# Altium schematic symbol library 三代电容_power.SchLib: 13 symbols
Pins are listed as number, name and electrical type; pins without a type are passive.

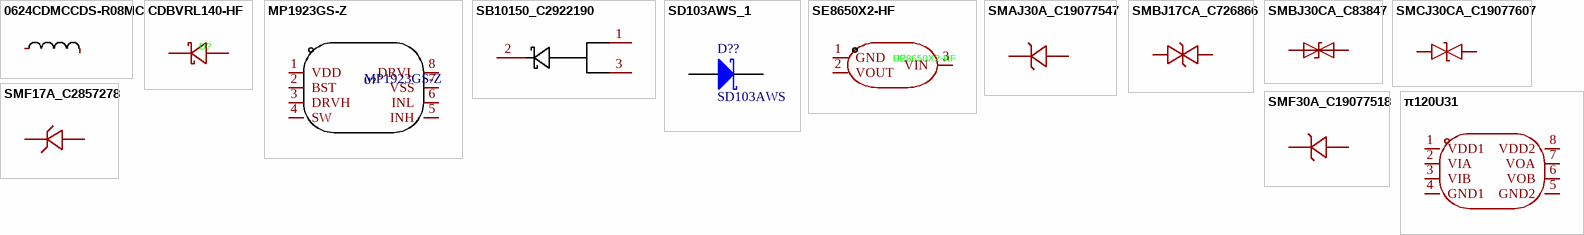
[diagram p0: symbols 0624CDMCCDS-R08MC to π120U31]

## 0624CDMCCDS-R08MC
designator U??  (value not drawn)
80nH; Manufacturer: Sumida(胜美达); Add into BOM: yes; Tolerance: ±20%; Rated Current: 42A; Saturation Current (Isat): 72A; DC Resistance (DCR): 0.7mΩ; Symbol: 0624CDMCCDS-R08MC; Device: 0624CDMCCDS-R08MC; Supplier: LCSC; Supplier Part: C2595937; Manufacturer Part: 0624CDMCCDS-R08MC; Value: 80nH; JLCPCB Part Class: Extended Part; LCSC Part Name: 80nH ±20% 72A; Supplier Footprint: -; Datasheet: https://atta.szlcsc.com/upload/public/pdf/source/20210417/204DE77F66B7BD684ACDD9D2F328B6A3.pdf; Convert to PCB: yes; Type: -; Ratings: -
footprint IND-SMD_L7.1-W6.6
pins: 1, 2

## CDBVRL140-HF
designator D?  (value not drawn)
Manufacturer: Comchip(典琦); Add into BOM: yes; Forward Voltage (Vf@If): 550mV@700mA; Reverse Voltage (Vr): 40V; Rectified Current: 1A; Reverse Leakage Current (Ir): 50uA@40V; Symbol: CDBVRL140-HF; Device: CDBVRL140-HF; LCSC Part Name: 电压:40V 电流:1A; Supplier Part: C3758192; Manufacturer Part: CDBVRL140-HF; Supplier Footprint: 0603; JLCPCB Part Class: Extended Part; Datasheet: https://atta.szlcsc.com/upload/public/pdf/source/20240116/3D60EEEEF0718EF97C1BF0B00CBFA01B.pdf; Supplier: LCSC; Convert to PCB: yes
footprint LED-SMD_L1.6-W0.8-RD-2
3D model LED0603_L1.6-W0.8-H0.6
pins: 1 A, 2 K

## MP1923GS-Z
designator U?
Manufacturer: SCT(芯洲科技); Symbol: SCT2450STER; Add into BOM: yes; Device: SCT2450STER; LCSC Part Name: 电源IC; Supplier Part: C509400; Manufacturer Part: SCT2450STER; Supplier Footprint: ESOP-8; JLCPCB Part Class: Extended Part; Datasheet: https://atta.szlcsc.com/upload/public/pdf/source/20200407/C509400_EDF779A672A59398CFBA9E95FA584FEC.pdf; Supplier: LCSC; Convert to PCB: yes
footprint ESOP-8_L4.9-W3.9-P1.27-LS6.0-BL-EP
pins: 1 VDD, 2 BST, 3 DRVH, 4 SW, 5 INH, 6 INL, 7 VSS, 8 DRVL

## SB10150_C2922190
designator D??  (value not drawn)
10A肖特基; Manufacturer: GOODWORK(固得沃克); Add into BOM: yes; Diode Configuration: 独立式; Forward Voltage (Vf@If): 900mV@10A; Reverse Voltage (Vr): 150V; Average Rectified Current (Io): 10A; Reverse Leakage Current (Ir): 20uA@150V; Symbol: SB10150_C2922190; Device: SB10150_C2922190; Supplier: LCSC; Supplier Part: C2922190; Manufacturer Part: SB10150; JLCPCB Part Class: Extended Part; LCSC Part Name: 电压:150V 电流:10A; Supplier Footprint: TO-277; Datasheet: https://atta.szlcsc.com/upload/public/pdf/source/20211009/AF8C3589B27F0CCB5AD5E667BFB17F78.pdf; Convert to PCB: yes
footprint TO-277_3P-L5.4-W4.0-LS6.5-TR
pins: 1, 2, 3

## SD103AWS_1
designator D??, comment SD103AWS
肖特基二极管; 属性: 40V/1A; BOM名称: 肖特基二极管
footprint SD103AWS
pins: 1 A, 2 K

## SE8650X2-HF
designator U?
5V_LDO; Manufacturer: SEAWARD(思旺); Add into BOM: yes; Output Type: 固定; Voltage - Supply: 80V; Output Voltage: 5V; Voltage Dropout: 700mV@(100mA); standby current: 2uA; Output Configuration: 正极; Number of Outputs: 1; Symbol: SE8650X2-HF; Device: SE8650X2-HF; LCSC Part Name: 输入80V 输出5V 200mA; Supplier Part: C496615; Manufacturer Part: SE8650X2-HF; Supplier Footprint: SOT-23; JLCPCB Part Class: Extended Part; Datasheet: https://atta.szlcsc.com/upload/public/pdf/source/20231204/E5912244F6D9E24D718D6BDA01187AC7.pdf; Supplier: LCSC; Convert to PCB: yes; Output Current: -; Power Supply Rejection Ratio (PSRR): -; Features: 短路保护(SCP)；低ESR；热关断(TSD)；带使能
footprint SOT-23-3_L2.9-W1.6-P1.90-LS2.8-BR
3D model SOT-23-3L_L2.9-W1.6-H1.1-LS2.8-P0.95
pins: 1 GND, 2 VOUT, 3 VIN

## SMAJ30A_C19077547
designator D?, comment SMAJ30A  (value not drawn)
Manufacturer: 宏嘉诚; Symbol: SMAJ30A_C19077547; Add into BOM: yes; Polarity: 单向; Reverse Stand-Off Voltage (Vrwm): 30V; Clamping Voltage: 48.4V; Peak Pulse Current (Ipp): 8.3A; Peak Pulse Power Dissipation (Ppp): 400W; Voltage - Breakdown: 33.3V; Reverse Leakage Current (Ir): 1uA; Number of Channels: 单路; Type: TVS; Device: SMAJ30A_C19077547; LCSC Part Name: SMAJ30A; Supplier Part: C19077547; Manufacturer Part: SMAJ30A; Supplier Footprint: SMA; JLCPCB Part Class: Extended Part; Datasheet: https://atta.szlcsc.com/upload/public/pdf/source/20250107/539D2DC1EE5F9F3FCEFE35DA61E92AD9.pdf; Supplier: LCSC; Convert to PCB: yes; Operating Temperature: -
footprint SMA_L4.3-W2.6-LS5.0-RD
3D model SMA_L4.3-W2.6-LS5.0-RD
pins: 1 K, 2 A

## SMBJ17CA_C726866
designator D?, comment SMBJ17CA  (value not drawn)
17V_tvs; Manufacturer: TWGMC(台湾迪嘉); Symbol: SMBJ17CA_C726866; Add into BOM: yes; polarity: 双向; Reverse Stand-Off Voltage (Vrwm): 17V; Maximum Clamping Voltage: 27.6V; Peak Pulse Current (Ipp): 21.8A; Peak Pulse Power Dissipation (Ppp): 600W; Breakdown Voltage: 20.9V; Reverse Leakage Current (Ir): 1uA; Type: TVS; Device: SMBJ17CA_C726866; LCSC Part Name: SMBJ17CA; Supplier Part: C726866; Manufacturer Part: SMBJ17CA; Supplier Footprint: SMB; JLCPCB Part Class: Extended Part; Datasheet: https://atta.szlcsc.com/upload/public/pdf/source/20200901/C726811_07201DC3516E92FF13903A0BAE18F725.pdf; Supplier: LCSC; Convert to PCB: yes; Operating Temperature: -65℃~+150℃
footprint SMB_L4.6-W3.6-LS5.3-BI
3D model SMB_L4.6-W3.6-LS5.3-BI
pins: 1, 2

## SMBJ30CA_C83847
designator D?, comment SMBJ30CA  (value not drawn)
Manufacturer: Littelfuse(美国力特); Symbol: SMBJ30CA_C83847; Add into BOM: yes; Reverse Stand-Off Voltage (Vrwm): 30V; Maximum Clamping Voltage: 48.4V; Peak Pulse Current (Ipp)@10/1000us: 12.4A; Peak Pulse Power Dissipation (Ppp)@10/1000us: 600W; Breakdown Voltage: 33.3V; Type: TVS; Device: SMBJ30CA_C83847; LCSC Part Name: SMBJ30CA; Supplier Part: C83847; Manufacturer Part: SMBJ30CA; Supplier Footprint: SMB(DO-214AA); JLCPCB Part Class: Extended Part; Datasheet: https://atta.szlcsc.com/upload/public/pdf/source/20190807/C409416_D98C874D944FBE9BE31A2BD6B7A21533.pdf; Supplier: LCSC; Convert to PCB: yes
footprint SMB_L4.3-W3.6-LS5.4-BI
3D model SMB_L4.3-W3.6-LS5.4-BI
pins: 1 A2, 2 A1

## SMCJ30CA_C19077607
designator D?, comment SMCJ30CA  (value not drawn)
Manufacturer: 宏嘉诚; Symbol: SMCJ30CA_C19077607; Add into BOM: yes; Polarity: 双向; Reverse Stand-Off Voltage (Vrwm): 30V; Clamping Voltage: 48.4V; Peak Pulse Current (Ipp): 31A; Peak Pulse Power Dissipation (Ppp): 1.5kW; Voltage - Breakdown: 36.8V; Reverse Leakage Current (Ir): 1uA; Type: TVS; Device: SMCJ30CA_C19077607; LCSC Part Name: SMCJ30CA; Supplier Part: C19077607; Manufacturer Part: SMCJ30CA; Supplier Footprint: SMC; JLCPCB Part Class: Extended Part; Datasheet: https://atta.szlcsc.com/upload/public/pdf/source/20250107/3386F1F8D1CAF72ED55746348B4D0228.pdf; Supplier: LCSC; Convert to PCB: yes; Operating Temperature: -
footprint SMC_L6.9-W5.9-LS7.9-BI
3D model SMC_L6.9-W5.9-H2.1-LS7.9
pins: 1, 2

## SMF17A_C2857278
designator D?, comment SMF17A  (value not drawn)
17V 单向; Manufacturer: JSMSEMI(杰盛微); Symbol: SMF17A_C2857278; Add into BOM: yes; Maximum Clamping Voltage: 27.6V; Peak Pulse Current (Ipp): 7.2A; Breakdown Voltage: 18.9V; Reverse Leakage Current (Ir): 1uA; Type: TVS; Device: SMF17A_C2857278; LCSC Part Name: SMF17A; Supplier Part: C2857278; Manufacturer Part: SMF17A; Supplier Footprint: SOD-123FL; JLCPCB Part Class: Extended Part; Datasheet: https://atta.szlcsc.com/upload/public/pdf/source/20220120/4066B4D37095FB947F97BAEB950D8525.pdf; Supplier: LCSC; Convert to PCB: yes; Reverse Stand-Off Voltage (Vrwm): 17V
footprint SOD-123FL_L2.8-W1.8-LS3.6-RD
3D model SOD-123FL_L2.8-W1.8-LS3.6-RD
pins: 1, 2

## SMF30A_C19077518
designator D?, comment SMF30A  (value not drawn)
单向 30V; Manufacturer: 宏迦橙; Symbol: SMF30A_C19077518; Add into BOM: yes; Maximum Clamping Voltage: 48.4V; Peak Pulse Current (Ipp): 4.1A; Peak Pulse Power Dissipation (Ppp): 200W; Breakdown Voltage: 33.3V; Reverse Leakage Current (Ir): 1uA; Number of Lines: 单路; Type: TVS; Device: SMF30A_C19077518; LCSC Part Name: SMF30A; Supplier Part: C19077518; Manufacturer Part: SMF30A; Supplier Footprint: SOD-123FL; JLCPCB Part Class: Extended Part; Datasheet: https://atta.szlcsc.com/upload/public/pdf/source/20241029/BBF9A11676F655A5C9D4546A153AB943.pdf; Supplier: LCSC; Convert to PCB: yes; polarity: 单向; Reverse Stand-Off Voltage (Vrwm): 30V; Operating Temperature: -55℃~+155℃
footprint SOD-123FL_L2.7-W1.8-LS3.8-RD
3D model SOD-123FL_L2.8-W1.8-H1.1-LS3.6
pins: 1 K, 2 A

## π120U31
designator U?  (value not drawn)
隔离器; Manufacturer: 2Pai Semi(荣湃); Add into BOM: yes; Number of Forward Channels: 2; Number of Reverse Channels: 0; Data Rate(Max): 150Kbps; Isolation Voltage(Vrms): 3000; Symbol: π120U31; Device: π120U31; LCSC Part Name: 增强型ESD 3.0kVrms/6.0kVrms 150Kbps双通道数字隔离器; Supplier Part: C471588; Manufacturer Part: π120U31; Supplier Footprint: SOIC-8; JLCPCB Part Class: Extended Part; Datasheet: https://atta.szlcsc.com/upload/public/pdf/source/20191223/C471588_CD8CD4905F4DCC0F3407249B7C47B378.pdf; Supplier: LCSC; Convert to PCB: yes
footprint SOIC-8_L5.0-W4.0-P1.27-LS6.0-BL
3D model SOIC-8_L4.9-W3.9-H1.7-LS6.0-P1.27
pins: 1 VDD1, 2 VIA, 3 VIB, 4 GND1, 5 GND2, 6 VOB, 7 VOA, 8 VDD2